# Altium footprint library ICs_VendorSpecific.PcbLib: 247 footprints (part 16 of 19)
Each footprint in its own frame and in the unit in brackets; x right, y up, seen from the top. Pads: shape width x height; smd on the part's side, far side on the other; paste and mask are expansions set on the pad; w line width, h text height; cw(c..) or ccw(c..) is an arc to the next point about the centre after c.
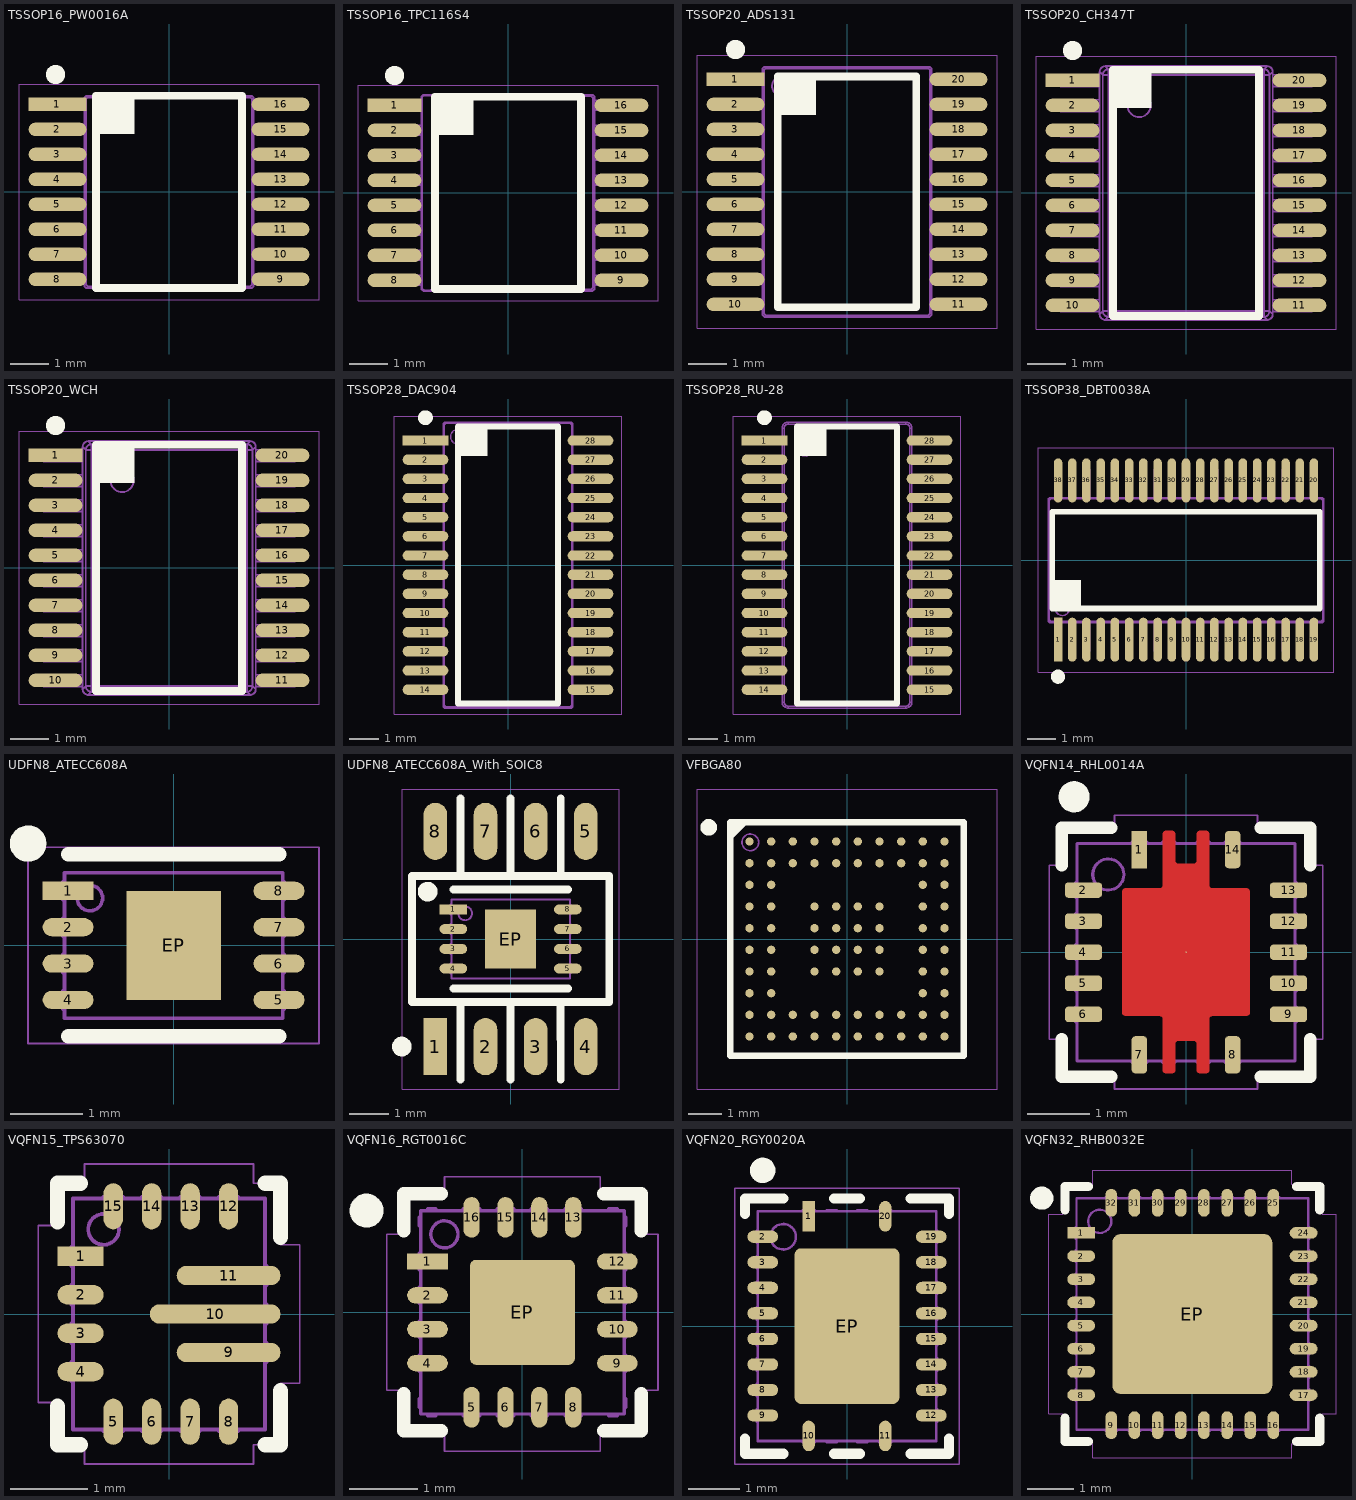
[diagram p15: the footprints below, top view; thin cyan lines are the x and y axes]

## TSSOP16_PW0016A [mm] "TSSOP, 16-Leads, Body 5.0x4.40mm, Pitch 0.65mm TI case style PW0016A"
height 1.2
pads (16):
  rect 1.5x0.35 smd paste+0 mask+0.05: 1(-2.9,2.275)
  oval 1.5x0.35 smd paste+0 mask+0.05: 2(-2.9,1.625) 3(-2.9,0.975) 4(-2.9,0.325) 5(-2.9,-0.325) 6(-2.9,-0.975) 7(-2.9,-1.625) 8(-2.9,-2.275) 9(2.9,-2.275) 10(2.9,-1.625) 11(2.9,-0.975) 12(2.9,-0.325) 13(2.9,0.325) 14(2.9,0.975) 15(2.9,1.625) 16(2.9,2.275)
Top Overlay:
  circle w0.25: c-2.95,3.05 r0.125
  region: -0.9,2.5 -1.9,2.5 -1.9,1.5 -0.9,1.5
  lines w0.2: -1.9,-2.5 -1.9,2.5 1.9,2.5 1.9,-2.5 -1.9,-2.5
Top Courtyard:
  lines w0.025: -3.9,-2.8 -3.9,2.8 3.9,2.8 3.9,-2.8 -3.9,-2.8
Top Assembly:
  drawing of 273 lines, arcs and shapes, not listed
  text ".Designator" at 0.453,-4.511 h2
3D body "TSSOP16_PW0016A.x_t": height 1.2, standoff 0, extent -3.2,-2.5 3.2,2.5

## TSSOP16_TPC116S4 [mm] "TSSOP, 16-Leads, Body 5.1x4.50mm, Pitch 0.65mm"
height 1.15
pads (16):
  rect 1.4x0.35 smd paste+0 mask+0.05: 1(-2.95,2.275)
  oval 1.4x0.35 smd paste+0 mask+0.05: 2(-2.95,1.625) 3(-2.95,0.975) 4(-2.95,0.325) 5(-2.95,-0.325) 6(-2.95,-0.975) 7(-2.95,-1.625) 8(-2.95,-2.275) 9(2.95,-2.275) 10(2.95,-1.625) 11(2.95,-0.975) 12(2.95,-0.325) 13(2.95,0.325) 14(2.95,0.975) 15(2.95,1.625) 16(2.95,2.275)
Top Overlay:
  circle w0.25: c-2.95,3.05 r0.125
  region: -0.9,2.5 -1.9,2.5 -1.9,1.5 -0.9,1.5
  lines w0.2: -1.9,-2.5 -1.9,2.5 1.9,2.5 1.9,-2.5 -1.9,-2.5
Top Courtyard:
  lines w0.025: -3.9,-2.8 -3.9,2.8 3.9,2.8 3.9,-2.8 -3.9,-2.8
Top Assembly:
  circle w0.05: c-1.45,2.05 r0.25
  lines w0.05: -2.898,-2.398 -2.898,-2.153 ; -2.898,-1.747 -2.898,-1.502 ; -2.898,-1.098 -2.898,-0.853 ; -2.898,-0.447 -2.898,-0.202 ; -2.898,0.202 -2.898,0.447 ; -2.898,0.853 -2.898,1.098 ; -2.898,1.502 -2.898,1.747 ; -2.898,2.153 -2.898,2.398 ; -2.831,-2.398 -2.831,-2.153 ; -2.831,-1.747 -2.831,-1.502 ; -2.831,-1.098 -2.831,-0.853 ; -2.831,-0.447 -2.831,-0.202 ; -2.831,0.202 -2.831,0.447 ; -2.831,0.853 -2.831,1.098 ; -2.831,1.502 -2.831,1.747 ; -2.831,2.153 -2.831,2.398 ; -2.737,-2.398 -2.737,-2.153 ; -2.737,-1.747 -2.737,-1.502 ; -2.737,-1.098 -2.737,-0.853 ; -2.737,-0.447 -2.737,-0.202 ; -2.737,0.202 -2.737,0.447 ; -2.737,0.853 -2.737,1.098 ; -2.737,1.502 -2.737,1.747 ; -2.737,2.153 -2.737,2.398 ; -2.592,-2.398 -2.592,-2.153 ; -2.592,-1.747 -2.592,-1.502 ; -2.592,-1.098 -2.592,-0.853 ; -2.592,-0.447 -2.592,-0.202 ; -2.592,0.202 -2.592,0.447 ; -2.592,0.853 -2.592,1.098 ; -2.592,1.502 -2.592,1.747 ; -2.592,2.153 -2.592,2.398 ; -2.25,-2.499 -2.237,-2.486 ; -2.25,-2.398 -3.3,-2.398 -3.3,-2.153 -2.25,-2.153 ; -2.25,-1.747 -3.3,-1.747 -3.3,-1.502 -2.25,-1.502 ; -2.25,-1.098 -3.3,-1.098 -3.3,-0.853 -2.25,-0.853 ; -2.25,-0.447 -3.3,-0.447 -3.3,-0.202 -2.25,-0.202 ; -2.25,0.202 -3.3,0.202 -3.3,0.447 -2.25,0.447 ; -2.25,0.853 -3.3,0.853 -3.3,1.098 -2.25,1.098 ; -2.25,1.502 -3.3,1.502 -3.3,1.747 -2.25,1.747 ; -2.25,2.153 -3.3,2.153 -3.3,2.398 -2.25,2.398 ; -2.25,2.5 -2.237,2.487 ; 2.25,-2.499 2.211,-2.46 ; 2.25,-2.398 3.3,-2.398 3.3,-2.153 2.25,-2.153 ; 2.25,-1.747 3.3,-1.747 3.3,-1.502 2.25,-1.502 ; 2.25,-1.098 3.3,-1.098 3.3,-0.853 2.25,-0.853 ; 2.25,-0.447 3.3,-0.447 3.3,-0.202 2.25,-0.202 ; 2.25,0.202 3.3,0.202 3.3,0.447 2.25,0.447 ; 2.25,0.853 3.3,0.853 3.3,1.098 2.25,1.098 ; 2.25,1.502 3.3,1.502 3.3,1.747 2.25,1.747 ; 2.25,2.153 3.3,2.153 3.3,2.398 2.25,2.398 ; 2.25,2.5 2.211,2.46 ; 2.592,-2.398 2.592,-2.153 ; 2.592,-1.747 2.592,-1.502 ; 2.592,-1.098 2.592,-0.853 ; 2.592,-0.447 2.592,-0.202 ; 2.592,0.202 2.592,0.447 ; 2.592,0.853 2.592,1.098 ; 2.592,1.502 2.592,1.747 ; 2.592,2.153 2.592,2.398 ; 2.737,-2.398 2.737,-2.153 ; 2.737,-1.747 2.737,-1.502 ; 2.737,-1.098 2.737,-0.853 ; 2.737,-0.447 2.737,-0.202 ; 2.737,0.202 2.737,0.447 ; 2.737,0.853 2.737,1.098 ; 2.737,1.502 2.737,1.747 ; 2.737,2.153 2.737,2.398 ; 2.831,-2.398 2.831,-2.153 ; 2.831,-1.747 2.831,-1.502 ; 2.831,-1.098 2.831,-0.853 ; 2.831,-0.447 2.831,-0.202 ; 2.831,0.202 2.831,0.447 ; 2.831,0.853 2.831,1.098 ; 2.831,1.502 2.831,1.747 ; 2.831,2.153 2.831,2.398 ; 2.898,-2.398 2.898,-2.153 ; 2.898,-1.747 2.898,-1.502 ; 2.898,-1.098 2.898,-0.853 ; 2.898,-0.447 2.898,-0.202 ; 2.898,0.202 2.898,0.447 ; 2.898,0.853 2.898,1.098 ; 2.898,1.502 2.898,1.747 ; 2.898,2.153 2.898,2.398 ; -2.237,-2.486 -2.237,2.487 ; -2.237,-2.486 -2.183,-2.533 ; -2.237,2.487 -2.182,2.533 ; -2.2,-2.55 -2.25,-2.5 -2.25,2.5 -2.2,2.55 ; -2.2,-2.55 -2.183,-2.533 ; -2.2,-2.55 2.2,-2.55 ; -2.199,2.55 -2.182,2.533 ; -2.2,2.55 2.2,2.55 ; -2.183,-2.533 -1.881,-2.511 ; -2.182,2.533 -1.881,2.511 ; -1.881,-2.511 -1.881,2.511 ; -1.881,-2.511 2.16,-2.511 ; -1.881,2.511 2.16,2.511 ; 2.16,-2.511 2.2,-2.55 ; 2.16,-2.511 2.211,-2.46 ; 2.16,2.511 2.199,2.55 ; 2.16,2.511 2.211,2.46 ; 2.2,-2.55 2.25,-2.5 2.25,2.5 2.2,2.55 ; 2.211,-2.46 2.211,2.46
  text ".Designator" at 0.453,-4.511 h2
3D body "TS3_TSSOP_16_A_TPC116S4_X_T.x_t": height 1.15, standoff 0, extent -3.3,-2.55 3.3,2.55

## TSSOP20_ADS131 [mm] "TSOP, 20-Leads, Body 6.50x4.40mm, Pitch 0.65mm"
height 1.1
pads (20):
  rect 1.5x0.35 smd paste+0 mask+0.05: 1(-2.9,2.925)
  oval 1.5x0.35 smd paste+0 mask+0.05: 2(-2.9,2.275) 3(-2.9,1.625) 4(-2.9,0.975) 5(-2.9,0.325) 6(-2.9,-0.325) 7(-2.9,-0.975) 8(-2.9,-1.625) 9(-2.9,-2.275) 10(-2.9,-2.925) 11(2.9,-2.925) 12(2.9,-2.275) 13(2.9,-1.625) 14(2.9,-0.975) 15(2.9,-0.325) 16(2.9,0.325) 17(2.9,0.975) 18(2.9,1.625) 19(2.9,2.275) 20(2.9,2.925)
Top Overlay:
  circle w0.25: c-2.9,3.7 r0.125
  region: -1.8,3 -1.8,2 -0.8,2 -0.8,3
  lines w0.2: -1.8,-3 -1.8,3 1.8,3 1.8,-3 -1.8,-3
Top Courtyard:
  lines w0.025: -3.9,-3.55 -3.9,3.55 3.9,3.55 3.9,-3.55 -3.9,-3.55
Top Assembly:
  drawing of 333 lines, arcs and shapes, not listed
  text ".Designator" at 0.339,-3.378 h1.5
3D body "TSSOP20_ADS131.x_t": height 1.2, standoff 0, extent -3.2,-3.25 3.2,3.25

## TSSOP20_CH347T [mm] "TSSOP, 20-Leads, Body 6.50x4.40mm, Pitch 0.65mm"
height 1.2
pads (20):
  rect 1.4x0.35 smd paste+0 mask+0.05: 1(-2.95,2.925)
  oval 1.4x0.35 smd paste+0 mask+0.05: 2(-2.95,2.275) 3(-2.95,1.625) 4(-2.95,0.975) 5(-2.95,0.325) 6(-2.95,-0.325) 7(-2.95,-0.975) 8(-2.95,-1.625) 9(-2.95,-2.275) 10(-2.95,-2.925) 11(2.95,-2.925) 12(2.95,-2.275) 13(2.95,-1.625) 14(2.95,-0.975) 15(2.95,-0.325) 16(2.95,0.325) 17(2.95,0.975) 18(2.95,1.625) 19(2.95,2.275) 20(2.95,2.925)
Top Overlay:
  circle w0.25: c-2.95,3.7 r0.125
  region: -0.9,3.2 -1.9,3.2 -1.9,2.2 -0.9,2.2
  lines w0.2: -1.9,-3.2 1.9,-3.2 1.9,3.2 -1.9,3.2 -1.9,-3.2
Top Courtyard:
  lines w0.025: -3.9,-3.55 -3.9,3.55 3.9,3.55 3.9,-3.55 -3.9,-3.55
Top Assembly:
  drawing of 315 lines, arcs and shapes, not listed
  text ".Designator" at 0.339,-3.378 h1.5
3D body "TSSOP20_WCH.x_t": height 1.2, standoff 0, extent -3.2,-3.25 3.2,3.25

## TSSOP20_WCH [mm] "TSSOP, 20-Leads, Body 6.50x4.40mm, Pitch 0.65mm"
height 1.2
pads (20):
  rect 1.4x0.35 smd paste+0 mask+0.05: 1(-2.95,2.925)
  oval 1.4x0.35 smd paste+0 mask+0.05: 2(-2.95,2.275) 3(-2.95,1.625) 4(-2.95,0.975) 5(-2.95,0.325) 6(-2.95,-0.325) 7(-2.95,-0.975) 8(-2.95,-1.625) 9(-2.95,-2.275) 10(-2.95,-2.925) 11(2.95,-2.925) 12(2.95,-2.275) 13(2.95,-1.625) 14(2.95,-0.975) 15(2.95,-0.325) 16(2.95,0.325) 17(2.95,0.975) 18(2.95,1.625) 19(2.95,2.275) 20(2.95,2.925)
Top Overlay:
  circle w0.25: c-2.95,3.7 r0.125
  region: -0.9,3.2 -1.9,3.2 -1.9,2.2 -0.9,2.2
  lines w0.2: -1.9,-3.2 1.9,-3.2 1.9,3.2 -1.9,3.2 -1.9,-3.2
Top Courtyard:
  lines w0.025: -3.9,-3.55 -3.9,3.55 3.9,3.55 3.9,-3.55 -3.9,-3.55
Top Assembly:
  drawing of 315 lines, arcs and shapes, not listed
  text ".Designator" at 0.339,-3.378 h1.5
3D body "TSSOP20_WCH.x_t": height 1.2, standoff 0, extent -3.2,-3.25 3.2,3.25

## TSSOP28_DAC904 [mm] "TSSOP, 28-Leads, Pitch 0.65mm"
height 1.1
pads (28):
  rect 1.55x0.35 smd paste+0 mask+0.05: 1(-2.8,4.225)
  oval 1.55x0.35 smd paste+0 mask+0.05: 2(-2.8,3.575) 3(-2.8,2.925) 4(-2.8,2.275) 5(-2.8,1.625) 6(-2.8,0.975) 7(-2.8,0.325) 8(-2.8,-0.325) 9(-2.8,-0.975) 10(-2.8,-1.625) 11(-2.8,-2.275) 12(-2.8,-2.925) 13(-2.8,-3.575) 14(-2.8,-4.225) 15(2.8,-4.225) 16(2.8,-3.575) 17(2.8,-2.925) 18(2.8,-2.275) 19(2.8,-1.625) 20(2.8,-0.975) 21(2.8,-0.325) 22(2.8,0.325) 23(2.8,0.975) 24(2.8,1.625) 25(2.8,2.275) 26(2.8,2.925) 27(2.8,3.575) 28(2.8,4.225)
Top Overlay:
  circle w0.25: c-2.8,5 r0.125
  region: -1.7,4.7 -1.7,3.7 -0.7,3.7 -0.7,4.7
  lines w0.2: -1.7,-4.7 1.7,-4.7 1.7,4.7 -1.7,4.7 -1.7,-4.7
Top Courtyard:
  lines w0.025: -3.85,-5.05 -3.85,5.05 3.85,5.05 3.85,-5.05 -3.85,-5.05
Top Assembly:
  drawing of 453 lines, arcs and shapes, not listed
  text ".Designator" at 0.453,-4.511 h2
3D body "TSSOP28_DAC904.x_t": height 1.2, standoff 0, extent -3.2,-4.85 3.2,4.85

## TSSOP28_RU-28 [mm] "TSSOP, 28-Leads, Pitch 0.65mm. Analog Devices case style RU-28"
height 1.1
pads (28):
  rect 1.55x0.35 smd paste+0 mask+0.05: 1(-2.8,4.225)
  oval 1.55x0.35 smd paste+0 mask+0.05: 2(-2.8,3.575) 3(-2.8,2.925) 4(-2.8,2.275) 5(-2.8,1.625) 6(-2.8,0.975) 7(-2.8,0.325) 8(-2.8,-0.325) 9(-2.8,-0.975) 10(-2.8,-1.625) 11(-2.8,-2.275) 12(-2.8,-2.925) 13(-2.8,-3.575) 14(-2.8,-4.225) 15(2.8,-4.225) 16(2.8,-3.575) 17(2.8,-2.925) 18(2.8,-2.275) 19(2.8,-1.625) 20(2.8,-0.975) 21(2.8,-0.325) 22(2.8,0.325) 23(2.8,0.975) 24(2.8,1.625) 25(2.8,2.275) 26(2.8,2.925) 27(2.8,3.575) 28(2.8,4.225)
Top Overlay:
  circle w0.25: c-2.8,5 r0.125
  region: -1.7,4.7 -1.7,3.7 -0.7,3.7 -0.7,4.7
  lines w0.2: -1.7,-4.7 1.7,-4.7 1.7,4.7 -1.7,4.7 -1.7,-4.7
Top Courtyard:
  lines w0.025: -3.85,-5.05 -3.85,5.05 3.85,5.05 3.85,-5.05 -3.85,-5.05
Top Assembly:
  drawing of 221 lines, arcs and shapes, not listed
  text ".Designator" at 0.453,-4.511 h2
3D body "TSSOP-28_RU-28_X_T.x_t": height 1.2, standoff 0, extent -3.2,-4.85 3.2,4.85

## TSSOP38_DBT0038A [mm] "TI case DBT0038A, 38-Leads, Body 4.40x9.70mm, Pitch 0.50mm"
height 1.2
pads (38):
  rect 0.3x1.55 smd paste+0 mask+0.05: 1(-4.5,-2.8)
  oval 0.3x1.55 smd paste+0 mask+0.05: 2(-4,-2.8) 3(-3.5,-2.8) 4(-3,-2.8) 5(-2.5,-2.8) 6(-2,-2.8) 7(-1.5,-2.8) 8(-1,-2.8) 9(-0.5,-2.8) 10(0,-2.8) 11(0.5,-2.8) 12(1,-2.8) 13(1.5,-2.8) 14(2,-2.8) 15(2.5,-2.8) 16(3,-2.8) 17(3.5,-2.8) 18(4,-2.8) 19(4.5,-2.8) 20(4.5,2.8) 21(4,2.8) 22(3.5,2.8) 23(3,2.8) 24(2.5,2.8) 25(2,2.8) 26(1.5,2.8) 27(1,2.8) 28(0.5,2.8) 29(0,2.8) 30(-0.5,2.8) 31(-1,2.8) 32(-1.5,2.8) 33(-2,2.8) 34(-2.5,2.8) 35(-3,2.8) 36(-3.5,2.8) 37(-4,2.8) 38(-4.5,2.8)
Top Overlay:
  circle w0.25: c-4.5,-4.1 r0.125
  rectangle: -4.7,-1.7 -3.7,-0.7
  lines w0.2: -4.7,-1.7 -4.7,1.7 4.7,1.7 4.7,-1.7 -4.7,-1.7
Top Courtyard:
  lines w0.025: -5.2,-3.95 -5.2,3.95 5.2,3.95 5.2,-3.95 -5.2,-3.95
Top Assembly:
  drawing of 291 lines, arcs and shapes, not listed
  text ".Designator" at -4.511,-0.453 h2
3D body "TSSOP38_DBT0038A.x_t": height 1.3, standoff 0, extent -4.851,-3.2 4.849,3.2

## UDFN8_ATECC608A [mm] "UDFN-8 2mm x 3mm, 0.5mm pitch"
height 0.55
pads (9):
  rect 0.7x0.25 smd mask+0.05: 1(-1.45,0.75)
  oval 0.7x0.25 smd mask+0.05: 2(-1.45,0.25) 3(-1.45,-0.25) 4(-1.45,-0.75) 5(1.45,-0.75) 6(1.45,-0.25) 7(1.45,0.25) 8(1.45,0.75)
  rect 1.3x1.5 smd paste-2 mask+0.05: EP(0,0)
Top Overlay:
  circle w0.25: c-2,1.4 r0.125
  lines w0.2: -1.45,-1.25 1.45,-1.25 ; -1.45,1.25 1.45,1.25
Top Paste:
  region: -0.15,0.75 -0.65,0.75 -0.65,0.15 -0.15,0.15
  rectangle: 0.15,0.15 0.65,0.75
  region: -0.15,-0.15 -0.65,-0.15 -0.65,-0.75 -0.15,-0.75
  rectangle: 0.15,-0.75 0.65,-0.15
Top Courtyard:
  lines w0.025: -2,-1.35 2,-1.35 2,1.35 -2,1.35 -2,-1.35
Top Assembly:
  circle w0.05: c-1.15,0.65 r0.175
  lines w0.05: -1.5,-0.875 -1.52,-0.875 -1.52,-0.625 -1.5,-0.625 ; -1.5,-0.375 -1.52,-0.375 -1.52,-0.125 -1.5,-0.125 ; -1.5,0.125 -1.52,0.125 -1.52,0.375 -1.5,0.375 ; -1.5,0.625 -1.52,0.625 -1.52,0.875 -1.5,0.875 ; 1.5,-0.875 1.52,-0.875 1.52,-0.625 1.5,-0.625 ; 1.5,-0.375 1.52,-0.375 1.52,-0.125 1.5,-0.125 ; 1.5,0.125 1.52,0.125 1.52,0.375 1.5,0.375 ; 1.5,0.625 1.52,0.625 1.52,0.875 1.5,0.875 ; -1.5,-1 1.5,-1 1.5,1 -1.5,1 -1.5,-1
  text ".Designator" at -2.815,-0.283 h1.25
3D body "ATECC608A.x_t": height 0.57, standoff 0, extent -1.52,-1 1.52,1

## UDFN8_ATECC608A_With_SOIC8 [mm] "UDFN-8 2mm x 3mm, 0.5mm pitch"
height 0.55
pads (17):
  rect 0.6x1.45 smd paste+0 mask+0.05: 1(-1.905,-2.725)
  rect 0.7x0.25 smd mask+0.05: 1(-1.45,0.75)
  oval 0.7x0.25 smd mask+0.05: 2(-1.45,0.25) 3(-1.45,-0.25) 4(-1.45,-0.75) 5(1.45,-0.75) 6(1.45,-0.25) 7(1.45,0.25) 8(1.45,0.75)
  oval 0.6x1.45 smd paste+0 mask+0.05: 2(-0.635,-2.725) 3(0.635,-2.725) 4(1.905,-2.725) 5(1.905,2.725) 6(0.635,2.725) 7(-0.635,2.725) 8(-1.905,2.725)
  rect 1.3x1.5 smd paste-2 mask+0.05: EP(0,0)
Top Overlay:
  circle w0.25: c-2.755,-2.725 r0.125
  circle w0.25: c-2.1,1.2 r0.125
  lines w0.2: -1.45,-1.25 1.45,-1.25 ; -1.45,1.25 1.45,1.25 ; -1.27,-3.556 -1.27,-1.601 ; -1.27,1.601 -1.27,3.556 ; 0,-3.556 0,-1.601 ; 0,1.601 0,3.556 ; 1.27,-3.556 1.27,-1.601 ; 1.27,1.601 1.27,3.556 ; -2.5,-1.6 2.5,-1.6 2.5,1.6 -2.5,1.6 -2.5,-1.6
Top Paste:
  region: -0.15,0.75 -0.65,0.75 -0.65,0.15 -0.15,0.15
  rectangle: 0.15,0.15 0.65,0.75
  region: -0.15,-0.15 -0.65,-0.15 -0.65,-0.75 -0.15,-0.75
  rectangle: 0.15,-0.75 0.65,-0.15
Top Courtyard:
  lines w0.025: -2.75,-3.8 -2.75,3.8 2.75,3.8 2.75,-3.8 -2.75,-3.8
Top Assembly:
  circle w0.05: c-1.15,0.65 r0.175
  lines w0.05: -1.5,-0.875 -1.52,-0.875 -1.52,-0.625 -1.5,-0.625 ; -1.5,-0.375 -1.52,-0.375 -1.52,-0.125 -1.5,-0.125 ; -1.5,0.125 -1.52,0.125 -1.52,0.375 -1.5,0.375 ; -1.5,0.625 -1.52,0.625 -1.52,0.875 -1.5,0.875 ; 1.5,-0.875 1.52,-0.875 1.52,-0.625 1.5,-0.625 ; 1.5,-0.375 1.52,-0.375 1.52,-0.125 1.5,-0.125 ; 1.5,0.125 1.52,0.125 1.52,0.375 1.5,0.375 ; 1.5,0.625 1.52,0.625 1.52,0.875 1.5,0.875 ; -1.5,-1 1.5,-1 1.5,1 -1.5,1 -1.5,-1
  text ".Designator" at -2.815,-0.283 h1.25
3D body "ATECC608A.x_t": height 0.57, standoff 0, extent -1.52,-1 1.52,1

## VFBGA80 [mm] "BGA, 80-Leads, Body 7,00x7,00mmx1,00mm, Pitch 0,65mm, Toshiba ref P-VFBGA80-0707-0.65-001"
height 1
pads (80):
  round 0.25 smd mask+0.05: A1(-2.925,2.925) A2(-2.275,2.925) A3(-1.625,2.925) A4(-0.975,2.925) A5(-0.325,2.925) A6(0.325,2.925) A7(0.975,2.925) A8(1.625,2.925) A9(2.275,2.925) A10(2.925,2.925) B1(-2.925,2.275) B2(-2.275,2.275) B3(-1.625,2.275) B4(-0.975,2.275) B5(-0.325,2.275) B6(0.325,2.275) B7(0.975,2.275) B8(1.625,2.275) B9(2.275,2.275) B10(2.925,2.275) C1(-2.925,1.625) C2(-2.275,1.625) C9(2.275,1.625) C10(2.925,1.625) D1(-2.925,0.975) D2(-2.275,0.975) D4(-0.975,0.975) D5(-0.325,0.975) D6(0.325,0.975) D7(0.975,0.975) D9(2.275,0.975) D10(2.925,0.975) E1(-2.925,0.325) E2(-2.275,0.325) E4(-0.975,0.325) E5(-0.325,0.325) E6(0.325,0.325) E7(0.975,0.325) E9(2.275,0.325) E10(2.925,0.325) F1(-2.925,-0.325) F2(-2.275,-0.325) F4(-0.975,-0.325) F5(-0.325,-0.325) F6(0.325,-0.325) F7(0.975,-0.325) F9(2.275,-0.325) F10(2.925,-0.325) G1(-2.925,-0.975) G2(-2.275,-0.975) G4(-0.975,-0.975) G5(-0.325,-0.975) G6(0.325,-0.975) G7(0.975,-0.975) G9(2.275,-0.975) G10(2.925,-0.975) H1(-2.925,-1.625) H2(-2.275,-1.625) H9(2.275,-1.625) H10(2.925,-1.625) J1(-2.925,-2.275) J2(-2.275,-2.275) J3(-1.625,-2.275) J4(-0.975,-2.275) J5(-0.325,-2.275) J6(0.325,-2.275) J7(0.975,-2.275) J8(1.625,-2.275) J9(2.275,-2.275) J10(2.925,-2.275) K1(-2.925,-2.925) K2(-2.275,-2.925) K3(-1.625,-2.925) K4(-0.975,-2.925) K5(-0.325,-2.925) K6(0.325,-2.925) K7(0.975,-2.925) K8(1.625,-2.925) K9(2.275,-2.925) K10(2.925,-2.925)
Top Overlay:
  circle w0.25: c-4.15,3.35 r0.125
  region: -3.092,3.5 -3.5,3.092 -3.5,3.5
  lines w0.2: -3.5,3.092 -3.092,3.5 ; -3.5,-3.5 3.5,-3.5 3.5,3.5 -3.5,3.5 -3.5,-3.5
Top Courtyard:
  lines w0.025: -4.5,-4.5 4.5,-4.5 4.5,4.5 -4.5,4.5 -4.5,-4.5
Top Assembly:
  circle w0.05: c-2.9,2.9 r0.25
  lines w0.05: -3.5,-3.5 3.5,-3.5 3.5,3.5 -3.5,3.5 -3.5,-3.5
  text ".Designator" at -4.511,-0.453 h2
3D body "P-VFBGA80-0707-0.65-001.x_t": height 1, standoff 0, extent -3.5,-3.5 3.5,3.5

## VQFN14_RHL0014A [mm] "VQFN-14 package 3.5x3.5mm with 0.5mm pitch"
height 1
pads (15):
  rect 0.25x0.6 smd paste+0 mask+0.05: 1(-0.75,1.65)
  rrect50% 0.6x0.25 smd paste+0 mask+0.05: 2(-1.65,1) 3(-1.65,0.5) 4(-1.65,0) 5(-1.65,-0.5) 6(-1.65,-1) 9(1.65,-1) 10(1.65,-0.5) 11(1.65,0) 12(1.65,0.5) 13(1.65,1)
  rrect50% 0.25x0.6 smd paste+0 mask+0.05: 7(-0.75,-1.65) 8(0.75,-1.65) 14(0.75,1.65)
  round 0.025 smd paste-10 mask+0.05: EP(0,0)
Top Layer:
  region: -1.025,-0.974 -1.025,-0.984 -1.017,-1.003 -1.003,-1.017 -0.984,-1.025 -0.974,-1.025 -0.425,-1.025 -0.415,-1.026 -0.397,-1.033 -0.383,-1.047 -0.376,-1.065 -0.375,-1.075 -0.375,-1.9 -0.375,-1.91 -0.367,-1.928 -0.353,-1.942 -0.335,-1.95 -0.325,-1.95 -0.225,-1.95 -0.215,-1.95 -0.197,-1.942 -0.183,-1.928 -0.175,-1.91 -0.175,-1.9 -0.175,-1.475 -0.174,-1.465 -0.167,-1.447 -0.153,-1.433 -0.135,-1.426 -0.125,-1.425 0.125,-1.425 0.135,-1.426 0.153,-1.433 0.167,-1.447 0.174,-1.465 0.175,-1.475 0.175,-1.9 0.175,-1.91 0.183,-1.928 0.197,-1.942 0.215,-1.95 0.225,-1.95 0.325,-1.95 0.335,-1.95 0.353,-1.942 0.367,-1.928 0.375,-1.91 0.375,-1.9 0.375,-1.075 0.376,-1.065 0.383,-1.047 0.397,-1.033 0.415,-1.026 0.425,-1.025 0.974,-1.025 0.984,-1.025 1.003,-1.017 1.017,-1.003 1.025,-0.984 1.025,-0.974 1.025,0.974 1.025,0.984 1.017,1.003 1.003,1.017 0.984,1.025 0.974,1.025 0.424,1.025 0.415,1.026 0.397,1.034 0.383,1.047 0.376,1.065 0.375,1.075 0.375,1.9 0.375,1.91 0.367,1.928 0.353,1.942 0.335,1.95 0.325,1.95 0.225,1.95 0.215,1.95 0.197,1.942 0.183,1.928 0.175,1.91 0.175,1.9 0.175,1.475 0.174,1.465 0.167,1.447 0.153,1.433 0.135,1.426 0.125,1.425 -0.125,1.425 -0.135,1.426 -0.153,1.433 -0.167,1.447 -0.174,1.465 -0.175,1.475 -0.175,1.9 -0.175,1.91 -0.182,1.928 -0.197,1.942 -0.215,1.95 -0.225,1.95 -0.325,1.95 -0.335,1.95 -0.353,1.942 -0.367,1.928 -0.375,1.91 -0.375,1.9 -0.375,1.075 -0.376,1.065 -0.383,1.047 -0.397,1.034 -0.415,1.026 -0.424,1.025 -0.974,1.025 -0.984,1.025 -1.003,1.017 -1.017,1.003 -1.025,0.984 -1.025,0.974
Top Overlay:
  circle w0.25: c-1.8,2.5 r0.125
  lines w0.2: -2,-1.4 -2,-2 -1.2,-2 ; -2,1.4 -2,2 -1.2,2 ; 1.2,-2 2,-2 2,-1.4 ; 1.2,2 2,2 2,1.4
Top Paste:
  rectangle: 0.45,-0.95 0.95,-0.45
  region: -0.45,-0.45 -0.95,-0.45 -0.95,-0.95 -0.45,-0.95
  region: 0.25,-0.45 -0.25,-0.45 -0.25,-0.95 0.25,-0.95
  region: -0.45,0.95 -0.95,0.95 -0.95,0.45 -0.45,0.45
  rectangle: 0.45,0.45 0.95,0.95
  rectangle: -0.25,0.45 0.25,0.95
  region: -0.45,0.25 -0.95,0.25 -0.95,-0.25 -0.45,-0.25
  rectangle: 0.45,-0.25 0.95,0.25
  rectangle: -0.25,-0.25 0.25,0.25
  region: -0.375,1.9 -0.375,1.91 -0.367,1.928 -0.353,1.942 -0.335,1.95 -0.325,1.95 -0.225,1.95 -0.215,1.95 -0.197,1.942 -0.183,1.928 -0.175,1.91 -0.175,1.9 -0.175,1.4 -0.175,1.39 -0.183,1.372 -0.197,1.358 -0.215,1.35 -0.225,1.35 -0.325,1.35 -0.335,1.35 -0.353,1.358 -0.367,1.372 -0.375,1.39 -0.375,1.4
  region: 0.375,1.9 0.375,1.91 0.367,1.928 0.353,1.942 0.335,1.95 0.325,1.95 0.225,1.95 0.215,1.95 0.197,1.942 0.183,1.928 0.175,1.91 0.175,1.9 0.175,1.4 0.175,1.39 0.183,1.372 0.197,1.358 0.215,1.35 0.225,1.35 0.325,1.35 0.335,1.35 0.353,1.358 0.367,1.372 0.375,1.39 0.375,1.4
  region: 0.375,-1.9 0.375,-1.91 0.367,-1.928 0.353,-1.942 0.335,-1.95 0.325,-1.95 0.225,-1.95 0.215,-1.95 0.197,-1.942 0.183,-1.928 0.175,-1.91 0.175,-1.9 0.175,-1.4 0.175,-1.39 0.183,-1.372 0.197,-1.358 0.215,-1.35 0.225,-1.35 0.325,-1.35 0.335,-1.35 0.353,-1.358 0.367,-1.372 0.375,-1.39 0.375,-1.4
  region: -0.375,-1.9 -0.375,-1.91 -0.367,-1.928 -0.353,-1.942 -0.335,-1.95 -0.325,-1.95 -0.225,-1.95 -0.215,-1.95 -0.197,-1.942 -0.183,-1.928 -0.175,-1.91 -0.175,-1.9 -0.175,-1.4 -0.175,-1.39 -0.183,-1.372 -0.197,-1.358 -0.215,-1.35 -0.225,-1.35 -0.325,-1.35 -0.335,-1.35 -0.353,-1.358 -0.367,-1.372 -0.375,-1.39 -0.375,-1.4
Top Courtyard:
  lines w0.025: -2.2,-1.4 -1.95,-1.4 -1.95,-1.95 -1.15,-1.95 -1.15,-2.2 1.15,-2.2 1.15,-1.95 1.95,-1.95 1.95,-1.4 2.2,-1.4 2.2,1.4 1.95,1.4 1.95,1.95 1.15,1.95 1.15,2.2 -1.15,2.2 -1.15,1.95 -1.95,1.95 -1.95,1.4 -2.2,1.4 -2.2,-1.4
Top Assembly:
  circle w0.05: c-1.25,1.25 r0.25
  lines w0.05: -1.75,-1.12 -1.775,-1.12 -1.775,-0.88 -1.75,-0.88 ; -1.75,-0.62 -1.775,-0.62 -1.775,-0.38 -1.75,-0.38 ; -1.75,-0.12 -1.775,-0.12 -1.775,0.12 -1.75,0.12 ; -1.75,0.38 -1.775,0.38 -1.775,0.62 -1.75,0.62 ; -1.75,0.88 -1.775,0.88 -1.775,1.12 -1.75,1.12 ; -0.87,-1.75 -0.87,-1.775 -0.63,-1.775 -0.63,-1.75 ; -0.87,1.75 -0.87,1.775 -0.63,1.775 -0.63,1.75 ; -0.375,-1.75 -0.375,-1.775 -0.175,-1.775 -0.175,-1.75 ; -0.375,1.75 -0.375,1.775 -0.175,1.775 -0.175,1.75 ; 0.175,-1.75 0.175,-1.775 0.375,-1.775 0.375,-1.75 ; 0.175,1.75 0.175,1.775 0.375,1.775 0.375,1.75 ; 0.63,-1.75 0.63,-1.775 0.87,-1.775 0.87,-1.75 ; 0.63,1.75 0.63,1.775 0.87,1.775 0.87,1.75 ; 1.75,-1.12 1.775,-1.12 1.775,-0.88 1.75,-0.88 ; 1.75,-0.62 1.775,-0.62 1.775,-0.38 1.75,-0.38 ; 1.75,-0.12 1.775,-0.12 1.775,0.12 1.75,0.12 ; 1.75,0.38 1.775,0.38 1.775,0.62 1.75,0.62 ; 1.75,0.88 1.775,0.88 1.775,1.12 1.75,1.12 ; -1.75,-1.75 -1.75,1.75 1.75,1.75 1.75,-1.75 -1.75,-1.75
  text ".Designator" at -4.511,-0.453 h2
3D body "VQFN14_RHL0014A.x_t": height 1.05, standoff 0, extent -1.775,-1.775 1.775,1.775

## VQFN15_TPS63070 [mm] "Power VQFN 3mm x 2.5mm, TI case RNM0015A"
height 1
pads (15):
  rect 0.6x0.25 smd paste-0.025 mask+0.05: 1(-1.15,0.75)
  oval 0.6x0.25 smd paste-0.025 mask+0.05: 2(-1.15,0.25) 3(-1.15,-0.25) 4(-1.15,-0.75)
  oval 0.25x0.6 smd paste-0.025 mask+0.05: 5(-0.725,-1.4) 6(-0.225,-1.4) 7(0.275,-1.4) 8(0.775,-1.4) 12(0.775,1.4) 13(0.275,1.4) 14(-0.225,1.4) 15(-0.725,1.4)
  oval 1.35x0.25 smd paste-0.025 mask+0.05: 9(0.775,-0.5) 11(0.775,0.5)
  oval 1.7x0.25 smd paste-0.025 mask+0.05: 10(0.6,0)
Top Overlay:
  lines w0.2: -1.45,-1.2 -1.45,-1.7 -1.15,-1.7 ; -1.45,1.2 -1.45,1.7 -1.15,1.7 ; 1.25,-1.7 1.45,-1.7 1.45,-1 ; 1.25,1.7 1.45,1.7 1.45,1
Top Solder:
  rectangle: 0.28,1.05 0.78,1.4
  rectangle: 0.28,-1.4 0.78,-1.05
Top Courtyard:
  lines w0.025: -1.7,-1.15 -1.45,-1.15 -1.45,-1.7 -1.1,-1.7 -1.1,-1.95 1.1,-1.95 1.1,-1.7 1.45,-1.7 1.45,-0.9 1.7,-0.9 1.7,0.9 1.45,0.9 1.45,1.7 1.1,1.7 1.1,1.95 -1.1,1.95 -1.1,1.7 -1.45,1.7 -1.45,1.15 -1.7,1.15 -1.7,-1.15
Top Assembly:
  circle w0.05: c-0.85,1.1 r0.2
  lines w0.05: -1.25,-0.875 -1.27,-0.875 -1.27,-0.625 -1.25,-0.625 ; -1.25,-0.375 -1.27,-0.375 -1.27,-0.125 -1.25,-0.125 ; -1.25,0.125 -1.27,0.125 -1.27,0.375 -1.25,0.375 ; -1.25,0.625 -1.27,0.625 -1.27,0.875 -1.25,0.875 ; -0.85,-1.5 -0.85,-1.52 -0.6,-1.52 -0.6,-1.5 ; -0.85,1.5 -0.85,1.52 -0.6,1.52 -0.6,1.5 ; -0.35,-1.5 -0.35,-1.52 -0.1,-1.52 -0.1,-1.5 ; -0.35,1.5 -0.35,1.52 -0.1,1.52 -0.1,1.5 ; 0.15,-1.5 0.15,-1.52 0.4,-1.52 0.4,-1.5 ; 0.15,1.5 0.15,1.52 0.4,1.52 0.4,1.5 ; 0.65,-1.5 0.65,-1.52 0.9,-1.52 0.9,-1.5 ; 0.65,1.5 0.65,1.52 0.9,1.52 0.9,1.5 ; 1.25,-0.625 1.27,-0.625 1.27,-0.375 1.25,-0.375 ; 1.25,-0.125 1.27,-0.125 1.27,0.125 1.25,0.125 ; 1.25,0.375 1.27,0.375 1.27,0.625 1.25,0.625 ; -1.25,-1.5 1.25,-1.5 1.25,1.5 -1.25,1.5 -1.25,-1.5
  text ".Designator" at -3.378,-0.339 h1.5
3D body "VQFN15_RNM0015A.x_t": height 1, standoff 0, extent -1.27,-1.52 1.27,1.52

## VQFN16_RGT0016C [mm] "Power VQFN 3mm x 3mm, TI case RGT0016C"
height 0.9
pads (17):
  rect 0.6x0.24 smd mask+0.05: 1(-1.4,0.75)
  oval 0.6x0.24 smd mask+0.05: 2(-1.4,0.25) 3(-1.4,-0.25) 4(-1.4,-0.75) 9(1.4,-0.75) 10(1.4,-0.25) 11(1.4,0.25) 12(1.4,0.75)
  oval 0.24x0.6 smd mask+0.05: 5(-0.75,-1.4) 6(-0.25,-1.4) 7(0.25,-1.4) 8(0.75,-1.4) 13(0.75,1.4) 14(0.25,1.4) 15(-0.25,1.4) 16(-0.75,1.4)
  rrect12% 1.55x1.55 smd paste-5 mask+0.05: EP(0,0)
Top Overlay:
  circle w0.25: c-2.3,1.5 r0.125
  lines w0.2: -1.75,-1.2 -1.75,-1.75 -1.2,-1.75 ; -1.75,1.2 -1.75,1.75 -1.2,1.75 ; 1.2,-1.75 1.75,-1.75 1.75,-1.2 ; 1.2,1.75 1.75,1.75 1.75,1.2
Top Paste:
  region: -0.1,-0.1 -0.7,-0.1 -0.7,-0.7 -0.1,-0.7
  region: 0.7,-0.1 0.1,-0.1 0.1,-0.7 0.7,-0.7
  region: -0.1,0.7 -0.7,0.7 -0.7,0.1 -0.1,0.1
  region: 0.7,0.7 0.1,0.7 0.1,0.1 0.7,0.1
Top Solder:
  region: 0,0.21 -0.82,0.21 -0.82,-0.21 0,-0.21
Top Courtyard:
  lines w0.025: -2,-1.15 -2,1.15 -1.7,1.15 -1.7,1.7 -1.15,1.7 -1.15,2 1.15,2 1.15,1.7 1.7,1.7 1.7,1.15 2,1.15 2,-1.15 1.7,-1.15 1.7,-1.7 1.15,-1.7 1.15,-2.05 -1.15,-2.05 -1.15,-1.7 -1.7,-1.7 -1.7,-1.15 -2,-1.15
Top Assembly:
  circle w0.05: c-1.15,1.15 r0.2
  lines w0.05: -1.5,-1.4 -1.525,-1.4 -1.525,-1.275 -1.5,-1.275 ; -1.5,-0.87 -1.525,-0.87 -1.525,-0.63 -1.5,-0.63 ; -1.5,-0.37 -1.525,-0.37 -1.525,-0.13 -1.5,-0.13 ; -1.5,0.13 -1.525,0.13 -1.525,0.37 -1.5,0.37 ; -1.5,0.63 -1.525,0.63 -1.525,0.87 -1.5,0.87 ; -1.5,1.275 -1.525,1.275 -1.525,1.4 -1.5,1.4 ; -1.4,-1.5 -1.4,-1.525 -1.275,-1.525 -1.275,-1.5 ; -1.4,1.5 -1.4,1.525 -1.275,1.525 -1.275,1.5 ; -0.87,-1.5 -0.87,-1.525 -0.63,-1.525 -0.63,-1.5 ; -0.87,1.5 -0.87,1.525 -0.63,1.525 -0.63,1.5 ; -0.37,-1.5 -0.37,-1.525 -0.13,-1.525 -0.13,-1.5 ; -0.37,1.5 -0.37,1.525 -0.13,1.525 -0.13,1.5 ; 0.13,-1.5 0.13,-1.525 0.37,-1.525 0.37,-1.5 ; 0.13,1.5 0.13,1.525 0.37,1.525 0.37,1.5 ; 0.63,-1.5 0.63,-1.525 0.87,-1.525 0.87,-1.5 ; 0.63,1.5 0.63,1.525 0.87,1.525 0.87,1.5 ; 1.275,-1.5 1.275,-1.525 1.4,-1.525 1.4,-1.5 ; 1.275,1.5 1.275,1.525 1.4,1.525 1.4,1.5 ; 1.5,-1.4 1.525,-1.4 1.525,-1.275 1.5,-1.275 ; 1.5,-0.87 1.525,-0.87 1.525,-0.63 1.5,-0.63 ; 1.5,-0.37 1.525,-0.37 1.525,-0.13 1.5,-0.13 ; 1.5,0.13 1.525,0.13 1.525,0.37 1.5,0.37 ; 1.5,0.63 1.525,0.63 1.525,0.87 1.5,0.87 ; 1.5,1.275 1.525,1.275 1.525,1.4 1.5,1.4 ; -1.5,-1.5 -1.5,1.5 1.5,1.5 1.5,-1.5 -1.5,-1.5
  text ".Designator" at -3.378,-0.339 h1.5
3D body "RGT0016C.x_t": height 1.05, standoff 0, extent -1.525,-1.525 1.525,1.525

## VQFN20_RGY0020A [mm] "Power VQFN 3.5mm x 4.5mm, TI case RGY0020A"
height 0.9
pads (21):
  rect 0.24x0.6 smd mask+0.05: 1(-0.75,2.15)
  oval 0.6x0.24 smd mask+0.05: 2(-1.65,1.75) 3(-1.65,1.25) 4(-1.65,0.75) 5(-1.65,0.25) 6(-1.65,-0.25) 7(-1.65,-0.75) 8(-1.65,-1.25) 9(-1.65,-1.75) 12(1.65,-1.75) 13(1.65,-1.25) 14(1.65,-0.75) 15(1.65,-0.25) 16(1.65,0.25) 17(1.65,0.75) 18(1.65,1.25) 19(1.65,1.75)
  oval 0.24x0.6 smd mask+0.05: 10(-0.75,-2.15) 11(0.75,-2.15) 20(0.75,2.15)
  rrect12% 2.05x3.05 smd paste-5 mask+0.05: EP(0,0)
Top Overlay:
  circle w0.25: c-1.65,3.05 r0.125
  lines w0.2: -2,-2.2 -2,-2.5 -1.25,-2.5 ; -2,2.2 -2,2.5 -1.25,2.5 ; -0.25,-2.5 0.25,-2.5 ; -0.25,2.5 0.25,2.5 ; 1.25,-2.5 2,-2.5 2,-2.2 ; 1.25,2.5 2,2.5 2,2.2
Top Paste:
  region: -0.15,0.4 -0.95,0.4 -0.95,-0.4 -0.15,-0.4
  region: 0.95,0.4 0.15,0.4 0.15,-0.4 0.95,-0.4
  region: -0.15,1.45 -0.95,1.45 -0.95,0.7 -0.15,0.7
  region: 0.95,1.45 0.15,1.45 0.15,0.7 0.95,0.7
  region: -0.15,-0.7 -0.95,-0.7 -0.95,-1.45 -0.15,-1.45
  region: 0.95,-0.7 0.15,-0.7 0.15,-1.45 0.95,-1.45
Top Solder:
  region: 0,0.21 -0.82,0.21 -0.82,-0.21 0,-0.21
Top Courtyard:
  lines w0.025: -2.2,-2.7 2.2,-2.7 2.2,2.7 -2.2,2.7 -2.2,-2.7
Top Assembly:
  circle w0.05: c-1.25,1.75 r0.25
  lines w0.05: -1.75,-1.87 -1.77,-1.87 -1.77,-1.63 -1.75,-1.63 ; -1.75,-1.37 -1.77,-1.37 -1.77,-1.13 -1.75,-1.13 ; -1.75,-0.87 -1.77,-0.87 -1.77,-0.63 -1.75,-0.63 ; -1.75,-0.37 -1.77,-0.37 -1.77,-0.13 -1.75,-0.13 ; -1.75,0.13 -1.77,0.13 -1.77,0.37 -1.75,0.37 ; -1.75,0.63 -1.77,0.63 -1.77,0.87 -1.75,0.87 ; -1.75,1.13 -1.77,1.13 -1.77,1.37 -1.75,1.37 ; -1.75,1.63 -1.77,1.63 -1.77,1.87 -1.75,1.87 ; -0.87,-2.25 -0.87,-2.27 -0.63,-2.27 -0.63,-2.25 ; -0.87,2.25 -0.87,2.27 -0.63,2.27 -0.63,2.25 ; -0.4,-2.25 -0.4,-2.27 -0.2,-2.27 -0.2,-2.25 ; -0.4,2.25 -0.4,2.27 -0.2,2.27 -0.2,2.25 ; 0.2,-2.25 0.2,-2.27 0.4,-2.27 0.4,-2.25 ; 0.2,2.25 0.2,2.27 0.4,2.27 0.4,2.25 ; 0.63,-2.25 0.63,-2.27 0.87,-2.27 0.87,-2.25 ; 0.63,2.25 0.63,2.27 0.87,2.27 0.87,2.25 ; 1.75,-1.87 1.77,-1.87 1.77,-1.63 1.75,-1.63 ; 1.75,-1.37 1.77,-1.37 1.77,-1.13 1.75,-1.13 ; 1.75,-0.87 1.77,-0.87 1.77,-0.63 1.75,-0.63 ; 1.75,-0.37 1.77,-0.37 1.77,-0.13 1.75,-0.13 ; 1.75,0.13 1.77,0.13 1.77,0.37 1.75,0.37 ; 1.75,0.63 1.77,0.63 1.77,0.87 1.75,0.87 ; 1.75,1.13 1.77,1.13 1.77,1.37 1.75,1.37 ; 1.75,1.63 1.77,1.63 1.77,1.87 1.75,1.87 ; -1.75,-2.25 1.75,-2.25 1.75,2.25 -1.75,2.25 -1.75,-2.25
  text ".Designator" at -3.378,-0.339 h1.5
3D body "RGY0020A.x_t": height 0.92, standoff 0, extent -1.77,-2.27 1.77,2.27

## VQFN32_RHB0032E [mm] "Power VQFN 5mm x 5mm, TI case RHB0032E"
height 1
pads (33):
  rect 0.6x0.25 smd paste+0 mask+0.05: 1(-2.4,1.75)
  oval 0.6x0.25 smd paste+0 mask+0.05: 2(-2.4,1.25) 3(-2.4,0.75) 4(-2.4,0.25) 5(-2.4,-0.25) 6(-2.4,-0.75) 7(-2.4,-1.25) 8(-2.4,-1.75) 17(2.4,-1.75) 18(2.4,-1.25) 19(2.4,-0.75) 20(2.4,-0.25) 21(2.4,0.25) 22(2.4,0.75) 23(2.4,1.25) 24(2.4,1.75)
  oval 0.25x0.6 smd paste+0 mask+0.05: 9(-1.75,-2.4) 10(-1.25,-2.4) 11(-0.75,-2.4) 12(-0.25,-2.4) 13(0.25,-2.4) 14(0.75,-2.4) 15(1.25,-2.4) 16(1.75,-2.4) 25(1.75,2.4) 26(1.25,2.4) 27(0.75,2.4) 28(0.25,2.4) 29(-0.25,2.4) 30(-0.75,2.4) 31(-1.25,2.4) 32(-1.75,2.4)
  rrect10% 3.45x3.45 smd paste-10 mask+0.05: EP(0,0)
Top Overlay:
  circle w0.25: c-3.25,2.5 r0.125
  lines w0.2: -2.75,-2.25 -2.75,-2.75 -2.25,-2.75 ; -2.75,2.25 -2.75,2.75 -2.25,2.75 ; 2.25,-2.75 2.75,-2.75 2.75,-2.25 ; 2.25,2.75 2.75,2.75 2.75,2.25
Top Paste:
  rectangle: -1.65,0.15 -0.15,1.65
  rectangle: 0.15,0.15 1.65,1.65
  rectangle: 0.15,-1.65 1.65,-0.15
  rectangle: -1.65,-1.65 -0.15,-0.15
Top Courtyard:
  lines w0.025: -3.1,-2.15 -3.1,2.15 -2.8,2.15 -2.8,2.8 -2.15,2.8 -2.15,3.1 2.15,3.1 2.15,2.8 2.8,2.8 2.8,2.15 3.1,2.15 3.1,-2.15 2.8,-2.15 2.8,-2.8 2.15,-2.8 2.15,-3.1 -2.15,-3.1 -2.15,-2.8 -2.8,-2.8 -2.8,-2.15 -3.1,-2.15
Top Assembly:
  circle w0.05: c-2,2 r0.25
  lines w0.05: -2.5,-1.875 -2.52,-1.875 -2.52,-1.625 -2.5,-1.625 ; -2.5,-1.375 -2.52,-1.375 -2.52,-1.125 -2.5,-1.125 ; -2.5,-0.875 -2.52,-0.875 -2.52,-0.625 -2.5,-0.625 ; -2.5,-0.375 -2.52,-0.375 -2.52,-0.125 -2.5,-0.125 ; -2.5,0.125 -2.52,0.125 -2.52,0.375 -2.5,0.375 ; -2.5,0.625 -2.52,0.625 -2.52,0.875 -2.5,0.875 ; -2.5,1.125 -2.52,1.125 -2.52,1.375 -2.5,1.375 ; -2.5,1.625 -2.52,1.625 -2.52,1.875 -2.5,1.875 ; -1.875,-2.5 -1.875,-2.52 -1.625,-2.52 -1.625,-2.5 ; -1.875,2.5 -1.875,2.52 -1.625,2.52 -1.625,2.5 ; -1.375,-2.5 -1.375,-2.52 -1.125,-2.52 -1.125,-2.5 ; -1.375,2.5 -1.375,2.52 -1.125,2.52 -1.125,2.5 ; -0.875,-2.5 -0.875,-2.52 -0.625,-2.52 -0.625,-2.5 ; -0.875,2.5 -0.875,2.52 -0.625,2.52 -0.625,2.5 ; -0.375,-2.5 -0.375,-2.52 -0.125,-2.52 -0.125,-2.5 ; -0.375,2.5 -0.375,2.52 -0.125,2.52 -0.125,2.5 ; 0.125,-2.5 0.125,-2.52 0.375,-2.52 0.375,-2.5 ; 0.125,2.5 0.125,2.52 0.375,2.52 0.375,2.5 ; 0.625,-2.5 0.625,-2.52 0.875,-2.52 0.875,-2.5 ; 0.625,2.5 0.625,2.52 0.875,2.52 0.875,2.5 ; 1.125,-2.5 1.125,-2.52 1.375,-2.52 1.375,-2.5 ; 1.125,2.5 1.125,2.52 1.375,2.52 1.375,2.5 ; 1.625,-2.5 1.625,-2.52 1.875,-2.52 1.875,-2.5 ; 1.625,2.5 1.625,2.52 1.875,2.52 1.875,2.5 ; 2.5,-1.875 2.52,-1.875 2.52,-1.625 2.5,-1.625 ; 2.5,-1.375 2.52,-1.375 2.52,-1.125 2.5,-1.125 ; 2.5,-0.875 2.52,-0.875 2.52,-0.625 2.5,-0.625 ; 2.5,-0.375 2.52,-0.375 2.52,-0.125 2.5,-0.125 ; 2.5,0.125 2.52,0.125 2.52,0.375 2.5,0.375 ; 2.5,0.625 2.52,0.625 2.52,0.875 2.5,0.875 ; 2.5,1.125 2.52,1.125 2.52,1.375 2.5,1.375 ; 2.5,1.625 2.52,1.625 2.52,1.875 2.5,1.875 ; -2.5,-2.5 2.5,-2.5 2.5,2.5 -2.5,2.5 -2.5,-2.5
  text ".Designator" at -4.511,-0.453 h2
3D body "VQFN32_RHB0032E.x_t": height 1.01, standoff -0.01, extent -2.52,-2.52 2.52,2.52